# Altium footprint library li-ion-18650-capacity-meter.PcbLib: 23 footprints (part 1 of 2)
Each footprint in its own frame and in the unit in brackets; x right, y up, seen from the top. Pads: shape width x height; smd on the part's side, far side on the other; paste and mask are expansions set on the pad; w line width, h text height; cw(c..) or ccw(c..) is an arc to the next point about the centre after c.
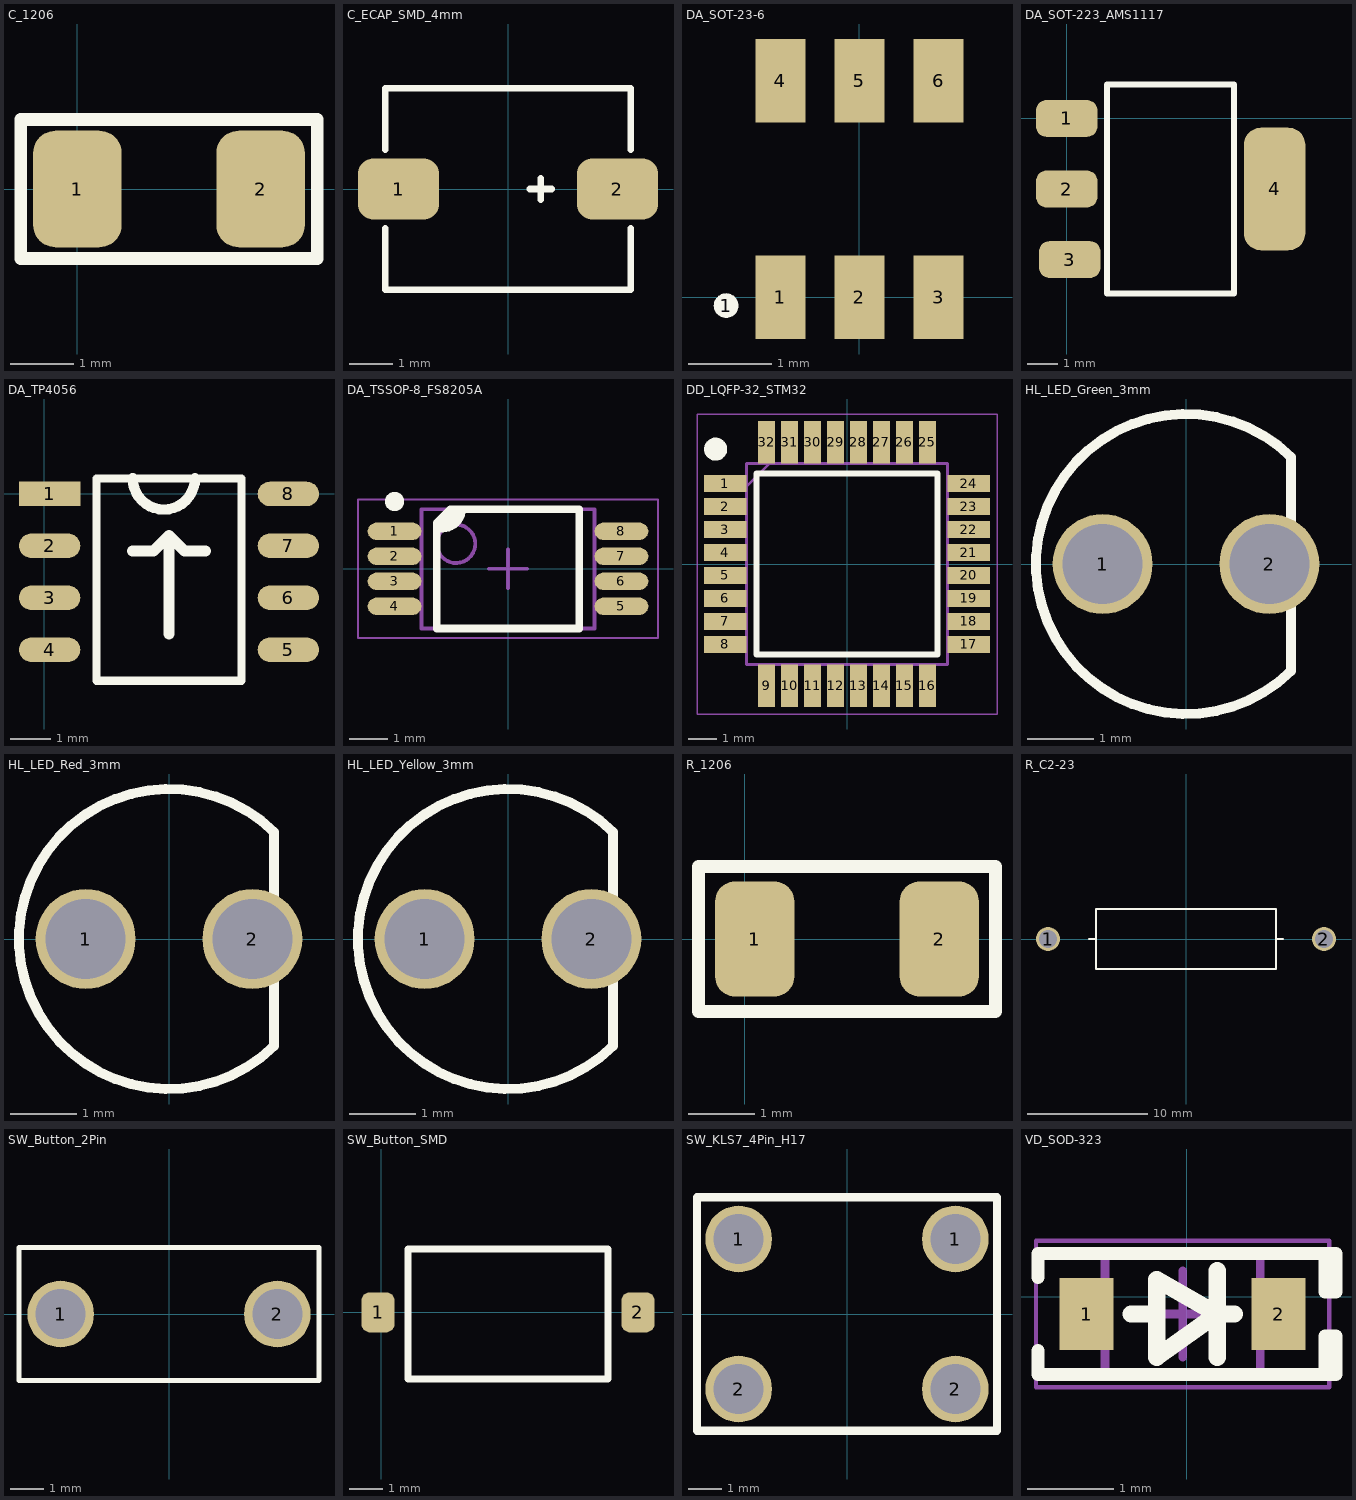
[diagram p0: the footprints below, top view; thin cyan lines are the x and y axes]

## C_1206 [mm] "1206 SMD ceramic capacitor land pattern for Murata GRM319R72A104KA01D and GRM31CR61A106KA01L."
pads (2):
  rrect50% 1.4x1.85 smd: 1(0,0) 2(2.9,0)
Top Overlay:
  lines w0.2: -0.9,-1.1 3.8,-1.1 3.8,1.1 -0.9,1.1 -0.9,-1.1
3D body "CAPC1206.step": height 1, standoff 0, extent -0.1,-0.8 3.1,0.8

## C_ECAP_SMD_4mm [mm] "Polarized SMD capacitor footprint, 4 mm body, used for JB Capacitors JCK1C100M040054."
pads (2):
  rrect50% 1.85x1.4 smd: 1(-2.5,0) 2(2.5,0)
Top Overlay:
  lines w0.15: -2.8,-0.9 -2.8,-2.3 2.8,-2.3 2.8,-0.9 ; -2.8,0.9 -2.8,2.3 2.8,2.3 2.8,0.9 ; 0.5,0 1,0 ; 0.75,-0.25 0.75,0.25
3D body "CAPAE-D4.0x5.4.stp": height 5.5, standoff 0, extent -2.75,-2.25 2.75,2.25

## DA_SOT-23-6 [mm] "Project footprint assigned to DW01A. Original library note: SOT143-4 per SP0503BAHTG (WRONG PIN ORDER). Verify pad numbering before use."
pads (7):
  round 0.3 on Top Overlay: 1(-1.6,-0.1)
  rect 0.6x1 smd: 1(-0.95,0) 2(0,0) 3(0.95,0) 4(-0.95,2.6) 5(0,2.6) 6(0.95,2.6)
3D body "SOT236.step": height 1, standoff 0, extent -1.46,0.13 1.46,2.47

## DA_SOT-223_AMS1117 [mm] "SOT-223 regulator footprint used for the UMW AMS1117-3.3."
pads (4):
  rrect55% 2x1.2 smd: 1(0,0) 2(0,-2.3) 3(0.1,-4.6)
  rrect55% 2x4 smd: 4(6.775,-2.3)
Top Overlay:
  lines w0.2: 1.317,-5.7 5.45,-5.7 5.45,1.1 1.317,1.1 1.317,-5.7
  text "." at -0.6,1.049 h4.5
3D body "AMS1117 Sot 223.step": height 1.8, standoff -0.22, extent -0.45,-5.579 6.923,0.921

## DA_TP4056 [mm] "Eight-pad SMD footprint used for the UMW TP4056 single-cell charger."
pads (8):
  rect 1.5x0.6 smd: 1(0.127,0)
  oval 1.5x0.6 smd: 2(0.127,-1.27) 3(0.127,-2.54) 4(0.127,-3.81) 5(5.969,-3.81) 6(5.969,-2.54) 7(5.969,-1.27) 8(5.969,0)
Top Overlay:
  lines w0.2: 1.273,-4.572 1.273,0.381 4.826,0.381 4.826,-4.572 1.273,-4.572
  lines w0.254: 2.159,0.381 ccw(c2.921,0.381) 2.921,-0.381 ccw(c2.921,0.381) 3.683,0.381
  lines w0.278: 2.159,-1.397 2.667,-1.397 3.048,-1.016 ; 3.048,-3.429 3.048,-1.016 ; 3.937,-1.397 3.429,-1.397 3.048,-1.016
Mechanical 15:
  lines w0.1: 3.027,-2.069 3.027,-1.069
3D body "ESOP-8.step": height 1.82, standoff 0, extent -0.052,-4.405 6.148,0.595

## DA_TSSOP-8_FS8205A [mm] "Eight-lead TSSOP footprint used for the FS8205A dual MOSFET in the cell protection circuit."
height 1.2
pads (8):
  oval 1.4x0.45 smd: 1(-2.95,0.975) 2(-2.95,0.325) 3(-2.95,-0.325) 4(-2.95,-0.975) 5(2.95,-0.975) 6(2.95,-0.325) 7(2.95,0.325) 8(2.95,0.975)
Top Overlay:
  circle w0.25: c-2.95,1.75 r0.125
  region: -1.5,1.55 -1.2,1.55 -1.2,1.451 -1.276,1.267 -1.417,1.126 -1.601,1.05 -1.7,1.05 -1.8,1.05 -1.8,1.25
  lines w0.2: -1.8,1.05 -1.7,1.05 ccw(c-1.7,1.55) -1.2,1.55 ; -1.85,-1.55 1.85,-1.55 1.85,1.55 -1.5,1.55 -1.85,1.2 -1.85,-1.55
Mechanical 13:
  circle w0.1: c-1.35,0.65 r0.5
  lines w0.1: -2.25,-1.55 -2.25,1.55 2.25,1.55 2.25,-1.55 -2.25,-1.55
Mechanical 15:
  lines w0.05: -3.9,-1.8 -3.9,1.8 3.9,1.8 3.9,-1.8 -3.9,-1.8
  lines w0.1: -0.5,0 0.5,0 ; 0,-0.5 0,0.5
3D body "TSSOP-8.STEP": height 1.2, standoff 0, extent -3.21,-1.5 3.211,1.5

## DD_LQFP-32_STM32 [mm] "32-lead LQFP footprint used for the STMicroelectronics STM32F051K8T6."
pads (32):
  rect 1.475x0.6 smd: 1(-4.238,2.8) 2(-4.238,2) 3(-4.238,1.2) 4(-4.238,0.4) 5(-4.238,-0.4) 6(-4.238,-1.2) 7(-4.238,-2) 8(-4.238,-2.8) 17(4.238,-2.8) 18(4.238,-2) 19(4.238,-1.2) 20(4.238,-0.4) 21(4.238,0.4) 22(4.238,1.2) 23(4.238,2) 24(4.238,2.8)
  rect 0.6x1.475 smd: 9(-2.8,-4.238) 10(-2,-4.238) 11(-1.2,-4.238) 12(-0.4,-4.238) 13(0.4,-4.238) 14(1.2,-4.238) 15(2,-4.238) 16(2.8,-4.238) 25(2.8,4.238) 26(2,4.238) 27(1.2,4.238) 28(0.4,4.238) 29(-0.4,4.238) 30(-1.2,4.238) 31(-2,4.238) 32(-2.8,4.238)
Top Overlay:
  circle w0.4: c-4.575,4 r0.2
  lines w0.2: -3.15,-3.15 3.15,-3.15 3.15,3.15 -3.15,3.15 -3.15,-3.15
Mechanical 15:
  lines w0.1: -3.5,2.7 -2.7,3.5 ; -3.5,-3.5 3.5,-3.5 3.5,3.5 -3.5,3.5 -3.5,-3.5
Mechanical 20:
  lines w0.05: -5.225,-5.225 5.225,-5.225 5.225,5.225 -5.225,5.225 -5.225,-5.225
3D body "STM32_LQFP32.stp": height 1.4, standoff -0.1, extent -4.518,-4.484 4.5,4.284

## HL_LED_Green_3mm [mm] "3 mm green indicator LED footprint for G-nor GNL-3014GD, 565 nm."
pads (2):
  round 1.5 hole 1.2: 1(-1.25,0) 2(1.25,0)
Top Overlay:
  lines w0.15: 1.578,-1.604 cw(c0,0) 1.579,1.603 1.579,-1.603 1.578,-1.604
3D body "led_green_wall.stp": height 24.6, standoff -1.93, extent -4,-1.998 4,2

## HL_LED_Red_3mm [mm] "3 mm red indicator LED footprint for G-nor GNL-3014HD, 700 nm."
pads (2):
  round 1.5 hole 1.2: 1(-1.25,0) 2(1.25,0)
Top Overlay:
  lines w0.15: 1.578,-1.604 cw(c0,0) 1.579,1.603 1.579,-1.603 1.578,-1.604
3D body "led_red_wall.stp": height 24.6, standoff -2.04, extent -4,-2 4,1.998

## HL_LED_Yellow_3mm [mm] "3 mm yellow indicator LED footprint for G-nor GNL-3014YD, 585 nm."
pads (2):
  round 1.5 hole 1.2: 1(-1.25,0) 2(1.25,0)
Top Overlay:
  lines w0.15: 1.578,-1.604 cw(c0,0) 1.579,1.603 1.579,-1.603 1.578,-1.604
3D body "led_yellow_wall.stp": height 24.6, standoff -2.56, extent -4,-2 4,1.998

## R_1206 [mm] "1206 SMD resistor land pattern used for Yageo RC1206 series chip resistors."
pads (2):
  rrect50% 1.2x1.75 smd: 1(0.15,0) 2(2.95,0)
Top Overlay:
  lines w0.2: -0.7,-1.1 3.8,-1.1 3.8,1.1 -0.7,1.1 -0.7,-1.1
3D body "RES_3216_1206.step": height 0.85, standoff 0, extent -0.125,-0.865 3.225,0.865

## R_C2-23 [mm] "Axial resistor footprint assigned to the Yageo MO-200 power resistors at R8 and R10."
pads (2):
  round 2 hole 1.5: 1(-11.5,0) 2(11.5,0)
Top Overlay:
  lines w0.15: -8.1,0 -7.5,0 ; 7.5,0 8.1,0 ; -7.5,-2.5 -1.4,-2.5 7.5,-2.5 7.5,2.5 -7.5,2.5 -7.5,-2.5
3D body "Res-2w-5-15mm-900.step": height 6.5, standoff -1.5, extent -11.83,-2.5 11.83,2.5

## SW_Button_2Pin [mm] "Two-pin pushbutton footprint, an alternate model for the switch symbol."
pads (2):
  round 2 hole 1.5: 1(-3.25,0) 2(3.25,0)
Top Overlay:
  lines w0.15: -4.5,-2 4.5,-2 4.5,2 -4.5,2 -4.5,0 -4.5,-2
3D body "SW_PUSH-6X3,5_DIP.STEP": height 5.4, standoff -3.04, extent -4.05,-1.75 4.05,1.75

## SW_Button_SMD [mm] "Two-pad SMD tactile switch footprint assigned to SW1, RUICHI IT-1181A, 6 x 3 x 2.5 mm."
pads (2):
  rrect50% 1x1.2 smd: 1(-0.1,0) 2(7.7,0)
Top Overlay:
  lines w0.2: 0.8,-2 0.8,1.9 6.8,1.9 6.8,-2 0.8,-2
3D body "Tactile_SMD_3x6x2.5mm.STEP": height 2.51, standoff 0, extent -0.226,-1.858 7.826,1.8

## SW_KLS7_4Pin_H17 [mm] "Four-pin KLS7 switch footprint, nominal height 17 mm per original library name."
pads (4):
  round 2 hole 1.5: 1(-3.25,2.25) 1(3.25,2.25) 2(-3.25,-2.25) 2(3.25,-2.25)
Top Overlay:
  lines w0.254: -4.5,-3.5 4.5,-3.5 4.5,3.5 -4.5,3.5 -4.5,-3.5
3D body "KLS7-TS6601-17-180.stp": height 17, standoff -3.5, extent -3.85,-3 3.85,3

## VD_SOD-323 [mm] "Two-terminal SOD-323 diode land pattern used for the BZT52C3V3S Zener diode."
height 0.8
pads (2):
  rect 0.625x0.83 smd: 1(-1.162,-0.2) 2(1.062,-0.2)
Top Overlay:
  lines w0.15: -1.728,-0.625 -1.728,-0.9 1.728,-0.9 1.728,-0.454 1.601,-0.454 1.601,-0.873 ; -1.728,0.225 -1.728,0.5 1.728,0.5 1.728,0.054 1.601,0.054 1.601,0.473
  lines w0.2: -0.65,-0.2 -0.35,-0.2 ; 0.35,-0.7 0.35,0.3 ; 0.55,-0.2 0.35,-0.2 ; 0.35,-0.2 -0.35,0.2 -0.35,-0.7 0.35,-0.2
Mechanical 13:
  lines w0.1: -0.95,-0.875 -0.95,0.475 0.85,0.475 0.85,-0.875 -0.95,-0.875
Mechanical 15:
  lines w0.05: -1.75,-1.05 -1.75,0.65 1.65,0.65 1.65,-1.05 -1.75,-1.05
  lines w0.1: -0.55,-0.2 0.45,-0.2 ; -0.05,-0.7 -0.05,0.3
3D body "SOD-323.step": height 1.05, standoff 0, extent -1.41,-0.825 1.311,0.425